# EAGLE library part TPD4E1U06 (library biogas_v2)
Protección ESD de 4 canales, SC70-6 (DCK)
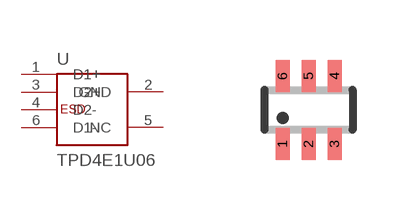
[diagram p1: symbol with the pads of SC70-6L; footprint SC70-6L]

Designator prefix U

## TPD4E1U06  [SC70-6L]
1  D1+  pas
2  GND  pas
3  D2+  pas
4  D2-  pas
5  NC  nc
6  D1-  pas

## Footprint SC70-6L (pad centres in mm)
SC-70 Package
smd 0.35 x 0.8: 1 -0.65,-0.85; 2 0,-0.85; 3 0.65,-0.85; 4 0.65,0.85; 5 0,0.85; 6 -0.65,0.85